# Altium schematic symbol library NTIR_Other_Passives.SchLib: 15 symbols (part 2 of 2)
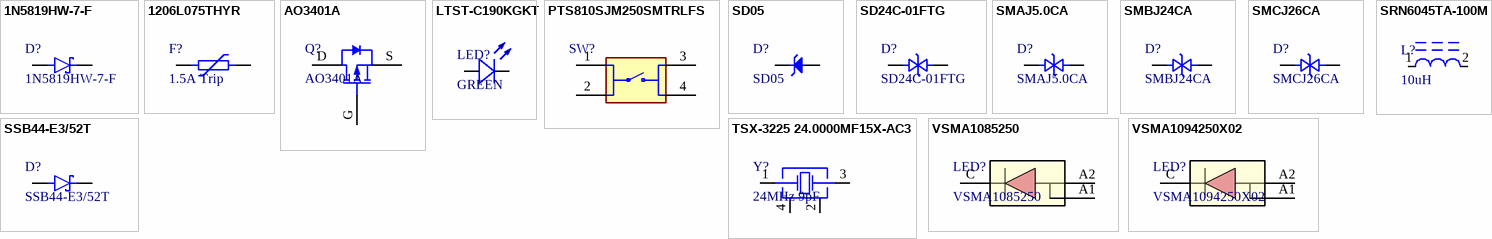
[diagram p1: symbols 1N5819HW-7-F to VSMA1094250X02]

## VSMA1085250
designator LED?
VSMA Series 850 nm 1.5 A 56° Surface Mount High Power Infrared Emitting Diode; Manufacturer: Vishay; Forward Current: 1.5A; Forward Voltage: 3.1V; Max Junction Temperature (Tj): 145°C; Number of Circuits: 1; Output Power: 2.1W; Peak Wavelength: 860nm; Power Dissipation: 5.33W; Reverse Voltage: 5V; Shape: Round; Supplier 1: DigiKey; Manufacturer Part Number: VSMA1085250; RoHS: Compliant; Category: LEDs; Stock 1: 8206; Pricing 1: 1=2.93, 10=2.127, 100=1.6498 (USD); Ambient Temperature Range High: 125°C; Country of Origin: Mainland China; Height: 2.995mm; Harmonized Tariff Schedule (HTS) Code: 8541.40.20.00; Introduction Date: 2021-11-09; Lifecycle Status: Production; Max Operating Temperature: 125°C; Min Operating Temperature: -40°C; Mount: Surface Mount; Viewing Angle: 56°; Wavelength: 860nm; ComponentLink1URL: https://datasheet.octopart.com:443/VSMA1085250-Vishay-datasheet-181480130.pdf?src-supplier=IHS; ComponentLink1Description: https://datasheet.octopart.com:443/VSMA1085250-Vishay-datasheet-181480130.pdf?src-supplier=IHS; ComponentLink2URL: https://datasheet.octopart.com:443/VSMA1085250-Vishay-datasheet-157283338.pdf?src-supplier=Upverter; ComponentLink2Description: https://datasheet.octopart.com:443/VSMA1085250-Vishay-datasheet-157283338.pdf?src-supplier=Upverter; ComponentLink3URL: https://datasheet.octopart.com:443/VSMA1085250-Vishay-datasheet-158277667.pdf?src-supplier=TME; ComponentLink3Description: https://datasheet.octopart.com:443/VSMA1085250-Vishay-datasheet-158277667.pdf?src-supplier=TME; ComponentLink4URL: http://sigma.octopart.com:80/rohs_statement/Vishay-company-15.pdf?src-supplier=Compliance+Statements; ComponentLink4Description: http://sigma.octopart.com:80/rohs_statement/Vishay-company-15.pdf?src-supplier=Compliance+Statements; Supplier Part Number 1: 751-VSMA1085250CT-ND
footprint DIODE_VSMA1085400_VIS
pins: A1, A2, C

## VSMA1094250X02
designator LED?
Infrared Emitters - High Power HIPOW IR EMITTING DIODE 940NM -E3; Manufacturer: Vishay; Viewing Angle: 28°; Supplier 1: DigiKey; Manufacturer Part Number: VSMA1094250X02; RoHS: Compliant; Category: Optoelectronics; Stock 1: 362; Pricing 1: 1=3.36, 10=2.456, 100=1.9169 (USD); Country of Origin: Mainland China; Harmonized Tariff Schedule (HTS) Code: 8541.40.20.00; Introduction Date: 2024-04-30; Lifecycle Status: Production; Wavelength: 940nm; ComponentLink1URL: https://datasheet.octopart.com:443/VSMA1094250X02-Vishay-datasheet-177116671.pdf?src-supplier=Future+Electronics; ComponentLink1Description: https://datasheet.octopart.com:443/VSMA1094250X02-Vishay-datasheet-177116671.pdf?src-supplier=Future+Electronics; ComponentLink2URL: http://sigma.octopart.com:80/rohs_statement/Vishay-company-15.pdf?src-supplier=Compliance+Statements; ComponentLink2Description: http://sigma.octopart.com:80/rohs_statement/Vishay-company-15.pdf?src-supplier=Compliance+Statements; Supplier Part Number 1: 751-VSMA1094250X02CT-ND
footprint DIODE_VSMA1085400_VIS
pins: A1, A2, C